# Altium integrated library BC817-40W_115.IntLib: 1 symbol
Pins are listed as number, name and electrical type; pins without a type are passive.

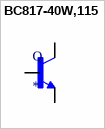
[diagram p0: symbol BC817-40W,115]

## BC817-40W,115
designator Q
Bipolar _BJT_ Transistor NPN 45V 500mA 100MHz 200mW Surface Mount SC-70; MF: Nexperia USA; MP: BC817-40W,115; Package: SOT-323 Nexperia; Value: *; Price: None; SnapEDA_Link: https://www.snapeda.com/parts/BC817-40W,115/Nexperia%20USA%20Inc./view-part/1842976/?ref=snap; Availability: Unavailable
footprint SOT65P210X110-3N
pins: 1 B, 2 E, 3 C